# Altium footprint library MY_LIB_Connectors_CONNFLY.PcbLib: 239 footprints (part 13 of 15)
Each footprint in its own frame and in the unit in brackets; x right, y up, seen from the top. Pads: shape width x height; smd on the part's side, far side on the other; paste and mask are expansions set on the pad; w line width, h text height; cw(c..) or ccw(c..) is an arc to the next point about the centre after c.
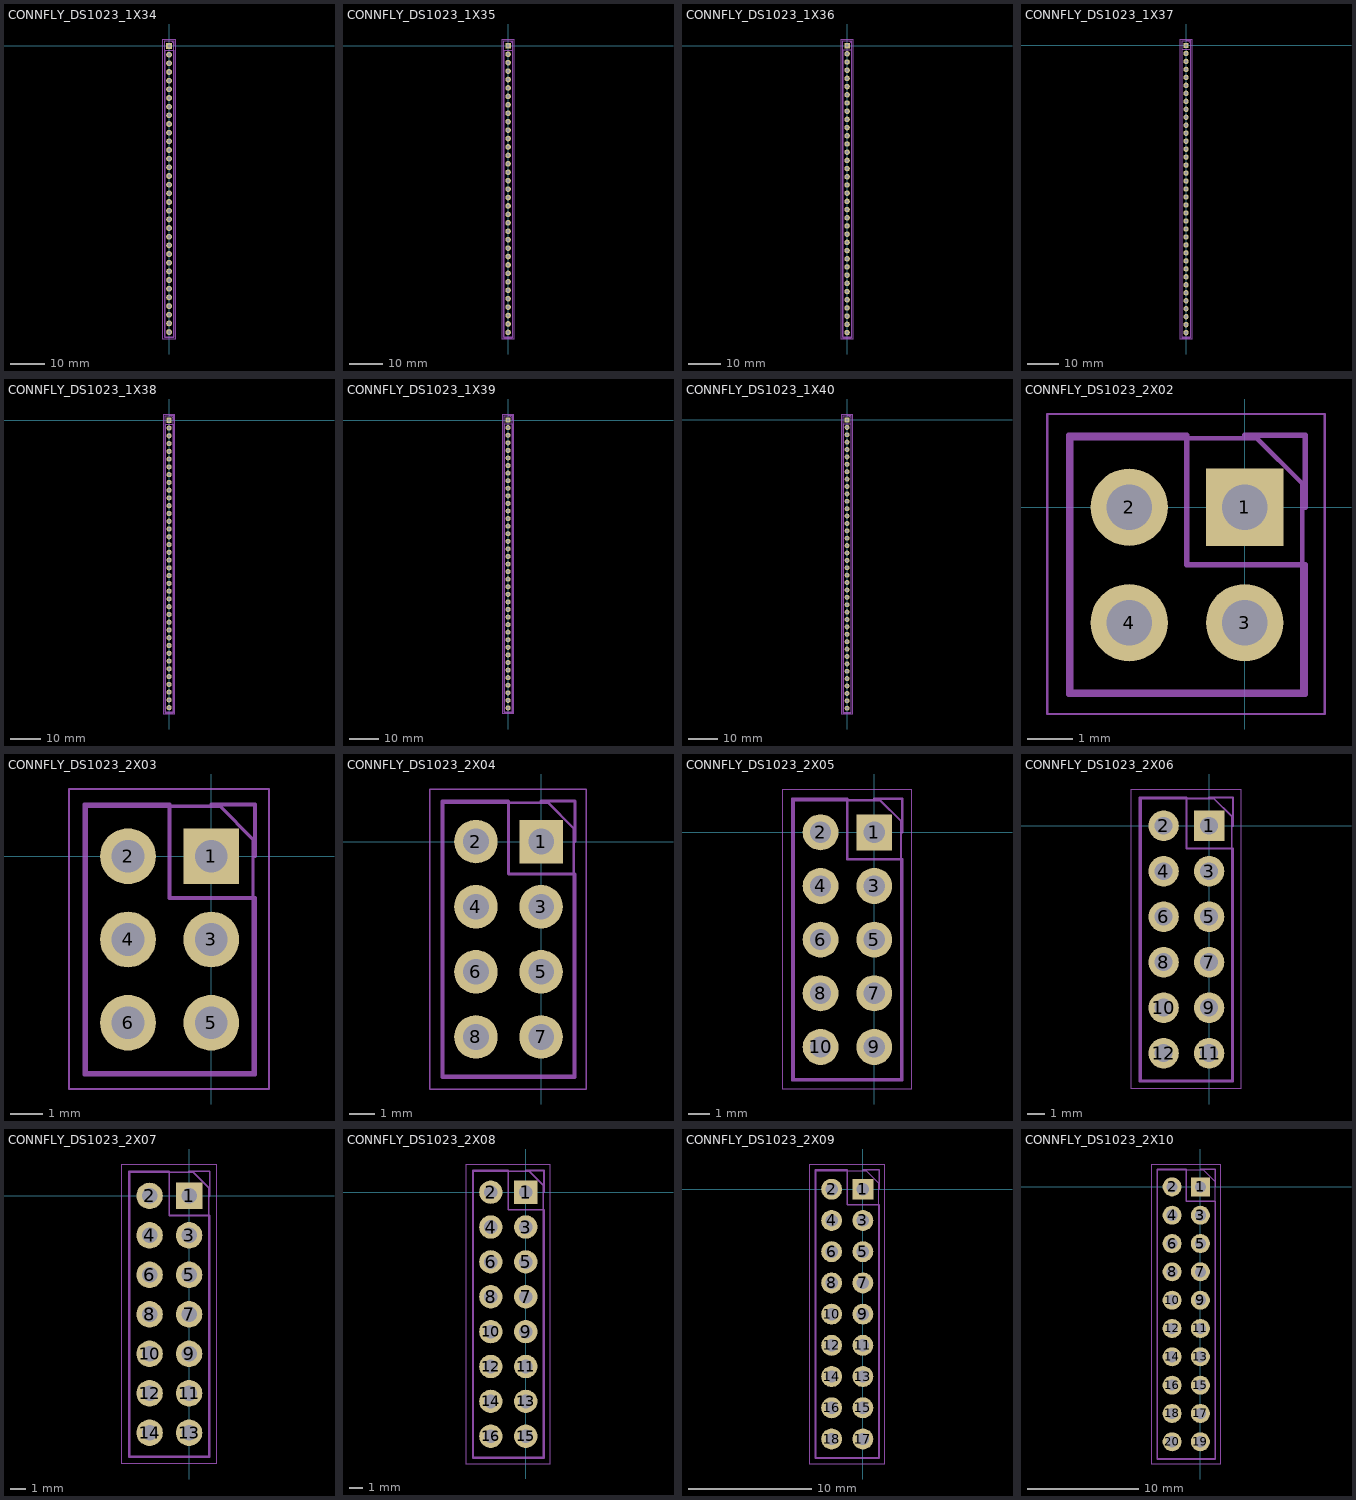
[diagram p12: the footprints below, top view; thin cyan lines are the x and y axes]

## CONNFLY_DS1023_1X34 [mm] "Connfly DS1023 1x34 standard KiCad; PTH1.0 pad1.7 pitch2.54; CC-BY-SA-4.0; STEP generic"
height 8.5
pads (34):
  rect 1.7x1.7 hole 1 paste-2539.97 mask+0.05: 1(0,0)
  round 1.7 hole 1 paste-2539.97 mask+0.05: 2(0,-2.54) 3(0,-5.08) 4(0,-7.62) 5(0,-10.16) 6(0,-12.7) 7(0,-15.24) 8(0,-17.78) 9(0,-20.32) 10(0,-22.86) 11(0,-25.4) 12(0,-27.94) 13(0,-30.48) 14(0,-33.02) 15(0,-35.56) 16(0,-38.1) 17(0,-40.64) 18(0,-43.18) 19(0,-45.72) 20(0,-48.26) 21(0,-50.8) 22(0,-53.34) 23(0,-55.88) 24(0,-58.42) 25(0,-60.96) 26(0,-63.5) 27(0,-66.04) 28(0,-68.58) 29(0,-71.12) 30(0,-73.66) 31(0,-76.2) 32(0,-78.74) 33(0,-81.28) 34(0,-83.82)
Mechanical 15:
  lines w0.05: -1.8,-85.85 -1.8,2.05 1.75,2.05 1.75,-85.85 -1.8,-85.85
  lines w0.1: -1.27,-85.34 -1.27,1.52 0.635,1.52 1.27,0.885 1.27,-85.34 -1.27,-85.34
  lines w0.12: 0,1.58 1.33,1.58 1.33,0 ; -1.33,-85.4 -1.33,-1.27 1.33,-1.27 1.33,-85.4 -1.33,-85.4
3D body "PinSocket_1x34_P2.54mm_Vertical.step": height 8.5, standoff -3.1, extent -1.27,-85.34 1.27,1.52

## CONNFLY_DS1023_1X35 [mm] "Connfly DS1023 1x35 standard KiCad; PTH1.0 pad1.7 pitch2.54; CC-BY-SA-4.0; STEP generic"
height 8.5
pads (35):
  rect 1.7x1.7 hole 1 paste-2539.97 mask+0.05: 1(0,0)
  round 1.7 hole 1 paste-2539.97 mask+0.05: 2(0,-2.54) 3(0,-5.08) 4(0,-7.62) 5(0,-10.16) 6(0,-12.7) 7(0,-15.24) 8(0,-17.78) 9(0,-20.32) 10(0,-22.86) 11(0,-25.4) 12(0,-27.94) 13(0,-30.48) 14(0,-33.02) 15(0,-35.56) 16(0,-38.1) 17(0,-40.64) 18(0,-43.18) 19(0,-45.72) 20(0,-48.26) 21(0,-50.8) 22(0,-53.34) 23(0,-55.88) 24(0,-58.42) 25(0,-60.96) 26(0,-63.5) 27(0,-66.04) 28(0,-68.58) 29(0,-71.12) 30(0,-73.66) 31(0,-76.2) 32(0,-78.74) 33(0,-81.28) 34(0,-83.82) 35(0,-86.36)
Mechanical 15:
  lines w0.05: -1.8,-88.35 -1.8,2.05 1.75,2.05 1.75,-88.35 -1.8,-88.35
  lines w0.1: -1.27,-87.88 -1.27,1.52 0.635,1.52 1.27,0.885 1.27,-87.88 -1.27,-87.88
  lines w0.12: 0,1.58 1.33,1.58 1.33,0 ; -1.33,-87.94 -1.33,-1.27 1.33,-1.27 1.33,-87.94 -1.33,-87.94
3D body "PinSocket_1x35_P2.54mm_Vertical.step": height 8.5, standoff -3.1, extent -1.27,-87.88 1.27,1.52

## CONNFLY_DS1023_1X36 [mm] "Connfly DS1023 1x36 standard KiCad; PTH1.0 pad1.7 pitch2.54; CC-BY-SA-4.0; STEP generic"
height 8.5
pads (36):
  rect 1.7x1.7 hole 1 paste-2539.97 mask+0.05: 1(0,0)
  round 1.7 hole 1 paste-2539.97 mask+0.05: 2(0,-2.54) 3(0,-5.08) 4(0,-7.62) 5(0,-10.16) 6(0,-12.7) 7(0,-15.24) 8(0,-17.78) 9(0,-20.32) 10(0,-22.86) 11(0,-25.4) 12(0,-27.94) 13(0,-30.48) 14(0,-33.02) 15(0,-35.56) 16(0,-38.1) 17(0,-40.64) 18(0,-43.18) 19(0,-45.72) 20(0,-48.26) 21(0,-50.8) 22(0,-53.34) 23(0,-55.88) 24(0,-58.42) 25(0,-60.96) 26(0,-63.5) 27(0,-66.04) 28(0,-68.58) 29(0,-71.12) 30(0,-73.66) 31(0,-76.2) 32(0,-78.74) 33(0,-81.28) 34(0,-83.82) 35(0,-86.36) 36(0,-88.9)
Mechanical 15:
  lines w0.05: -1.8,-90.9 -1.8,2.05 1.75,2.05 1.75,-90.9 -1.8,-90.9
  lines w0.1: -1.27,-90.42 -1.27,1.52 0.635,1.52 1.27,0.885 1.27,-90.42 -1.27,-90.42
  lines w0.12: 0,1.58 1.33,1.58 1.33,0 ; -1.33,-90.48 -1.33,-1.27 1.33,-1.27 1.33,-90.48 -1.33,-90.48
3D body "PinSocket_1x36_P2.54mm_Vertical.step": height 8.5, standoff -3.1, extent -1.27,-90.42 1.27,1.52

## CONNFLY_DS1023_1X37 [mm] "Connfly DS1023 1x37 standard KiCad; PTH1.0 pad1.7 pitch2.54; CC-BY-SA-4.0; STEP generic"
height 8.5
pads (37):
  rect 1.7x1.7 hole 1 paste-2539.97 mask+0.05: 1(0,0)
  round 1.7 hole 1 paste-2539.97 mask+0.05: 2(0,-2.54) 3(0,-5.08) 4(0,-7.62) 5(0,-10.16) 6(0,-12.7) 7(0,-15.24) 8(0,-17.78) 9(0,-20.32) 10(0,-22.86) 11(0,-25.4) 12(0,-27.94) 13(0,-30.48) 14(0,-33.02) 15(0,-35.56) 16(0,-38.1) 17(0,-40.64) 18(0,-43.18) 19(0,-45.72) 20(0,-48.26) 21(0,-50.8) 22(0,-53.34) 23(0,-55.88) 24(0,-58.42) 25(0,-60.96) 26(0,-63.5) 27(0,-66.04) 28(0,-68.58) 29(0,-71.12) 30(0,-73.66) 31(0,-76.2) 32(0,-78.74) 33(0,-81.28) 34(0,-83.82) 35(0,-86.36) 36(0,-88.9) 37(0,-91.44)
Mechanical 15:
  lines w0.05: -1.8,-93.45 -1.8,2.05 1.75,2.05 1.75,-93.45 -1.8,-93.45
  lines w0.1: -1.27,-92.96 -1.27,1.52 0.635,1.52 1.27,0.885 1.27,-92.96 -1.27,-92.96
  lines w0.12: 0,1.58 1.33,1.58 1.33,0 ; -1.33,-93.02 -1.33,-1.27 1.33,-1.27 1.33,-93.02 -1.33,-93.02
3D body "PinSocket_1x37_P2.54mm_Vertical.step": height 8.5, standoff -3.1, extent -1.27,-92.96 1.27,1.52

## CONNFLY_DS1023_1X38 [mm] "Connfly DS1023 1x38 standard KiCad; PTH1.0 pad1.7 pitch2.54; CC-BY-SA-4.0; STEP generic"
height 8.5
pads (38):
  rect 1.7x1.7 hole 1 paste-2539.97 mask+0.05: 1(0,0)
  round 1.7 hole 1 paste-2539.97 mask+0.05: 2(0,-2.54) 3(0,-5.08) 4(0,-7.62) 5(0,-10.16) 6(0,-12.7) 7(0,-15.24) 8(0,-17.78) 9(0,-20.32) 10(0,-22.86) 11(0,-25.4) 12(0,-27.94) 13(0,-30.48) 14(0,-33.02) 15(0,-35.56) 16(0,-38.1) 17(0,-40.64) 18(0,-43.18) 19(0,-45.72) 20(0,-48.26) 21(0,-50.8) 22(0,-53.34) 23(0,-55.88) 24(0,-58.42) 25(0,-60.96) 26(0,-63.5) 27(0,-66.04) 28(0,-68.58) 29(0,-71.12) 30(0,-73.66) 31(0,-76.2) 32(0,-78.74) 33(0,-81.28) 34(0,-83.82) 35(0,-86.36) 36(0,-88.9) 37(0,-91.44) 38(0,-93.98)
Mechanical 15:
  lines w0.05: -1.8,-96.05 -1.8,2.05 1.75,2.05 1.75,-96.05 -1.8,-96.05
  lines w0.1: -1.27,-95.5 -1.27,1.52 0.635,1.52 1.27,0.885 1.27,-95.5 -1.27,-95.5
  lines w0.12: 0,1.58 1.33,1.58 1.33,0 ; -1.33,-95.56 -1.33,-1.27 1.33,-1.27 1.33,-95.56 -1.33,-95.56
3D body "PinSocket_1x38_P2.54mm_Vertical.step": height 8.5, standoff -3.1, extent -1.27,-95.5 1.27,1.52

## CONNFLY_DS1023_1X39 [mm] "Connfly DS1023 1x39 standard KiCad; PTH1.0 pad1.7 pitch2.54; CC-BY-SA-4.0; STEP generic"
height 8.5
pads (39):
  rect 1.7x1.7 hole 1 paste-2539.97 mask+0.05: 1(0,0)
  round 1.7 hole 1 paste-2539.97 mask+0.05: 2(0,-2.54) 3(0,-5.08) 4(0,-7.62) 5(0,-10.16) 6(0,-12.7) 7(0,-15.24) 8(0,-17.78) 9(0,-20.32) 10(0,-22.86) 11(0,-25.4) 12(0,-27.94) 13(0,-30.48) 14(0,-33.02) 15(0,-35.56) 16(0,-38.1) 17(0,-40.64) 18(0,-43.18) 19(0,-45.72) 20(0,-48.26) 21(0,-50.8) 22(0,-53.34) 23(0,-55.88) 24(0,-58.42) 25(0,-60.96) 26(0,-63.5) 27(0,-66.04) 28(0,-68.58) 29(0,-71.12) 30(0,-73.66) 31(0,-76.2) 32(0,-78.74) 33(0,-81.28) 34(0,-83.82) 35(0,-86.36) 36(0,-88.9) 37(0,-91.44) 38(0,-93.98) 39(0,-96.52)
Mechanical 15:
  lines w0.05: -1.8,-98.55 -1.8,2.05 1.75,2.05 1.75,-98.55 -1.8,-98.55
  lines w0.1: -1.27,-98.04 -1.27,1.52 0.635,1.52 1.27,0.885 1.27,-98.04 -1.27,-98.04
  lines w0.12: 0,1.58 1.33,1.58 1.33,0 ; -1.33,-98.1 -1.33,-1.27 1.33,-1.27 1.33,-98.1 -1.33,-98.1
3D body "PinSocket_1x39_P2.54mm_Vertical.step": height 8.5, standoff -3.1, extent -1.27,-98.04 1.27,1.52

## CONNFLY_DS1023_1X40 [mm] "Connfly DS1023 1x40 standard KiCad; PTH1.0 pad1.7 pitch2.54; CC-BY-SA-4.0; STEP generic"
height 8.5
pads (40):
  rect 1.7x1.7 hole 1 paste-2539.97 mask+0.05: 1(0,0)
  round 1.7 hole 1 paste-2539.97 mask+0.05: 2(0,-2.54) 3(0,-5.08) 4(0,-7.62) 5(0,-10.16) 6(0,-12.7) 7(0,-15.24) 8(0,-17.78) 9(0,-20.32) 10(0,-22.86) 11(0,-25.4) 12(0,-27.94) 13(0,-30.48) 14(0,-33.02) 15(0,-35.56) 16(0,-38.1) 17(0,-40.64) 18(0,-43.18) 19(0,-45.72) 20(0,-48.26) 21(0,-50.8) 22(0,-53.34) 23(0,-55.88) 24(0,-58.42) 25(0,-60.96) 26(0,-63.5) 27(0,-66.04) 28(0,-68.58) 29(0,-71.12) 30(0,-73.66) 31(0,-76.2) 32(0,-78.74) 33(0,-81.28) 34(0,-83.82) 35(0,-86.36) 36(0,-88.9) 37(0,-91.44) 38(0,-93.98) 39(0,-96.52) 40(0,-99.06)
Mechanical 15:
  lines w0.05: -1.8,-101.05 -1.8,2.05 1.75,2.05 1.75,-101.05 -1.8,-101.05
  lines w0.1: -1.27,-100.58 -1.27,1.52 0.635,1.52 1.27,0.885 1.27,-100.58 -1.27,-100.58
  lines w0.12: 0,1.58 1.33,1.58 1.33,0 ; -1.33,-100.64 -1.33,-1.27 1.33,-1.27 1.33,-100.64 -1.33,-100.64
3D body "PinSocket_1x40_P2.54mm_Vertical.step": height 8.5, standoff -3.1, extent -1.27,-100.58 1.27,1.52

## CONNFLY_DS1023_2X02 [mm] "Connfly DS1023 2x2 standard KiCad; PTH1.0 pad1.7 pitch2.54; CC-BY-SA-4.0; STEP generic"
height 8.5
pads (4):
  rect 1.7x1.7 hole 1 paste-2539.97 mask+0.05: 1(0,0)
  round 1.7 hole 1 paste-2539.97 mask+0.05: 2(-2.54,0) 3(0,-2.54) 4(-2.54,-2.54)
Mechanical 15:
  lines w0.05: -4.34,-4.55 -4.34,2.05 1.76,2.05 1.76,-4.55 -4.34,-4.55
  lines w0.1: -3.81,-4.06 -3.81,1.52 0.27,1.52 1.27,0.52 1.27,-4.06 -3.81,-4.06
  lines w0.12: 0,1.58 1.33,1.58 1.33,0 ; -3.87,-4.12 -3.87,1.58 -1.27,1.58 -1.27,-1.27 1.33,-1.27 1.33,-4.12 -3.87,-4.12
3D body "PinSocket_2x02_P2.54mm_Vertical.step": height 8.5, standoff -3.1, extent -3.81,-4.06 1.27,1.52

## CONNFLY_DS1023_2X03 [mm] "Connfly DS1023 2x3 standard KiCad; PTH1.0 pad1.7 pitch2.54; CC-BY-SA-4.0; STEP generic"
height 8.5
pads (6):
  rect 1.7x1.7 hole 1 paste-2539.97 mask+0.05: 1(0,0)
  round 1.7 hole 1 paste-2539.97 mask+0.05: 2(-2.54,0) 3(0,-2.54) 4(-2.54,-2.54) 5(0,-5.08) 6(-2.54,-5.08)
Mechanical 15:
  lines w0.05: -4.34,-7.1 -4.34,2.05 1.76,2.05 1.76,-7.1 -4.34,-7.1
  lines w0.1: -3.81,-6.6 -3.81,1.52 0.27,1.52 1.27,0.52 1.27,-6.6 -3.81,-6.6
  lines w0.12: 0,1.58 1.33,1.58 1.33,0 ; -3.87,-6.66 -3.87,1.58 -1.27,1.58 -1.27,-1.27 1.33,-1.27 1.33,-6.66 -3.87,-6.66
3D body "PinSocket_2x03_P2.54mm_Vertical.step": height 8.5, standoff -3.1, extent -3.81,-6.6 1.27,1.52

## CONNFLY_DS1023_2X04 [mm] "Connfly DS1023 2x4 standard KiCad; PTH1.0 pad1.7 pitch2.54; CC-BY-SA-4.0; STEP generic"
height 8.5
pads (8):
  rect 1.7x1.7 hole 1 paste-2539.97 mask+0.05: 1(0,0)
  round 1.7 hole 1 paste-2539.97 mask+0.05: 2(-2.54,0) 3(0,-2.54) 4(-2.54,-2.54) 5(0,-5.08) 6(-2.54,-5.08) 7(0,-7.62) 8(-2.54,-7.62)
Mechanical 15:
  lines w0.05: -4.34,-9.65 -4.34,2.05 1.76,2.05 1.76,-9.65 -4.34,-9.65
  lines w0.1: -3.81,-9.14 -3.81,1.52 0.27,1.52 1.27,0.52 1.27,-9.14 -3.81,-9.14
  lines w0.12: 0,1.58 1.33,1.58 1.33,0 ; -3.87,-9.2 -3.87,1.58 -1.27,1.58 -1.27,-1.27 1.33,-1.27 1.33,-9.2 -3.87,-9.2
3D body "PinSocket_2x04_P2.54mm_Vertical.step": height 8.5, standoff -3.1, extent -3.81,-9.14 1.27,1.52

## CONNFLY_DS1023_2X05 [mm] "Connfly DS1023 2x5 standard KiCad; PTH1.0 pad1.7 pitch2.54; CC-BY-SA-4.0; STEP generic"
height 8.5
pads (10):
  rect 1.7x1.7 hole 1 paste-2539.97 mask+0.05: 1(0,0)
  round 1.7 hole 1 paste-2539.97 mask+0.05: 2(-2.54,0) 3(0,-2.54) 4(-2.54,-2.54) 5(0,-5.08) 6(-2.54,-5.08) 7(0,-7.62) 8(-2.54,-7.62) 9(0,-10.16) 10(-2.54,-10.16)
Mechanical 15:
  lines w0.05: -4.34,-12.15 -4.34,2.05 1.76,2.05 1.76,-12.15 -4.34,-12.15
  lines w0.1: -3.81,-11.68 -3.81,1.52 0.27,1.52 1.27,0.52 1.27,-11.68 -3.81,-11.68
  lines w0.12: 0,1.58 1.33,1.58 1.33,0 ; -3.87,-11.74 -3.87,1.58 -1.27,1.58 -1.27,-1.27 1.33,-1.27 1.33,-11.74 -3.87,-11.74
3D body "PinSocket_2x05_P2.54mm_Vertical.step": height 8.5, standoff -3.1, extent -3.81,-11.68 1.27,1.52

## CONNFLY_DS1023_2X06 [mm] "Connfly DS1023 2x6 standard KiCad; PTH1.0 pad1.7 pitch2.54; CC-BY-SA-4.0; STEP generic"
height 8.5
pads (12):
  rect 1.7x1.7 hole 1 paste-2539.97 mask+0.05: 1(0,0)
  round 1.7 hole 1 paste-2539.97 mask+0.05: 2(-2.54,0) 3(0,-2.54) 4(-2.54,-2.54) 5(0,-5.08) 6(-2.54,-5.08) 7(0,-7.62) 8(-2.54,-7.62) 9(0,-10.16) 10(-2.54,-10.16) 11(0,-12.7) 12(-2.54,-12.7)
Mechanical 15:
  lines w0.05: -4.34,-14.7 -4.34,2.05 1.76,2.05 1.76,-14.7 -4.34,-14.7
  lines w0.1: -3.81,-14.22 -3.81,1.52 0.27,1.52 1.27,0.52 1.27,-14.22 -3.81,-14.22
  lines w0.12: 0,1.58 1.33,1.58 1.33,0 ; -3.87,-14.28 -3.87,1.58 -1.27,1.58 -1.27,-1.27 1.33,-1.27 1.33,-14.28 -3.87,-14.28
3D body "PinSocket_2x06_P2.54mm_Vertical.step": height 8.5, standoff -3.1, extent -3.81,-14.22 1.27,1.52

## CONNFLY_DS1023_2X07 [mm] "Connfly DS1023 2x7 standard KiCad; PTH1.0 pad1.7 pitch2.54; CC-BY-SA-4.0; STEP generic"
height 8.5
pads (14):
  rect 1.7x1.7 hole 1 paste-2539.97 mask+0.05: 1(0,0)
  round 1.7 hole 1 paste-2539.97 mask+0.05: 2(-2.54,0) 3(0,-2.54) 4(-2.54,-2.54) 5(0,-5.08) 6(-2.54,-5.08) 7(0,-7.62) 8(-2.54,-7.62) 9(0,-10.16) 10(-2.54,-10.16) 11(0,-12.7) 12(-2.54,-12.7) 13(0,-15.24) 14(-2.54,-15.24)
Mechanical 15:
  lines w0.05: -4.34,-17.25 -4.34,2.05 1.76,2.05 1.76,-17.25 -4.34,-17.25
  lines w0.1: -3.81,-16.76 -3.81,1.52 0.27,1.52 1.27,0.52 1.27,-16.76 -3.81,-16.76
  lines w0.12: 0,1.58 1.33,1.58 1.33,0 ; -3.87,-16.82 -3.87,1.58 -1.27,1.58 -1.27,-1.27 1.33,-1.27 1.33,-16.82 -3.87,-16.82
3D body "PinSocket_2x07_P2.54mm_Vertical.step": height 8.5, standoff -3.1, extent -3.81,-16.76 1.27,1.52

## CONNFLY_DS1023_2X08 [mm] "Connfly DS1023 2x8 standard KiCad; PTH1.0 pad1.7 pitch2.54; CC-BY-SA-4.0; STEP generic"
height 8.5
pads (16):
  rect 1.7x1.7 hole 1 paste-2539.97 mask+0.05: 1(0,0)
  round 1.7 hole 1 paste-2539.97 mask+0.05: 2(-2.54,0) 3(0,-2.54) 4(-2.54,-2.54) 5(0,-5.08) 6(-2.54,-5.08) 7(0,-7.62) 8(-2.54,-7.62) 9(0,-10.16) 10(-2.54,-10.16) 11(0,-12.7) 12(-2.54,-12.7) 13(0,-15.24) 14(-2.54,-15.24) 15(0,-17.78) 16(-2.54,-17.78)
Mechanical 15:
  lines w0.05: -4.34,-19.8 -4.34,2.05 1.76,2.05 1.76,-19.8 -4.34,-19.8
  lines w0.1: -3.81,-19.3 -3.81,1.52 0.27,1.52 1.27,0.52 1.27,-19.3 -3.81,-19.3
  lines w0.12: 0,1.58 1.33,1.58 1.33,0 ; -3.87,-19.36 -3.87,1.58 -1.27,1.58 -1.27,-1.27 1.33,-1.27 1.33,-19.36 -3.87,-19.36
3D body "PinSocket_2x08_P2.54mm_Vertical.step": height 8.5, standoff -3.1, extent -3.81,-19.3 1.27,1.52

## CONNFLY_DS1023_2X09 [mm] "Connfly DS1023 2x9 standard KiCad; PTH1.0 pad1.7 pitch2.54; CC-BY-SA-4.0; STEP generic"
height 8.5
pads (18):
  rect 1.7x1.7 hole 1 paste-2539.97 mask+0.05: 1(0,0)
  round 1.7 hole 1 paste-2539.97 mask+0.05: 2(-2.54,0) 3(0,-2.54) 4(-2.54,-2.54) 5(0,-5.08) 6(-2.54,-5.08) 7(0,-7.62) 8(-2.54,-7.62) 9(0,-10.16) 10(-2.54,-10.16) 11(0,-12.7) 12(-2.54,-12.7) 13(0,-15.24) 14(-2.54,-15.24) 15(0,-17.78) 16(-2.54,-17.78) 17(0,-20.32) 18(-2.54,-20.32)
Mechanical 15:
  lines w0.05: -4.34,-22.35 -4.34,2.05 1.76,2.05 1.76,-22.35 -4.34,-22.35
  lines w0.1: -3.81,-21.84 -3.81,1.52 0.27,1.52 1.27,0.52 1.27,-21.84 -3.81,-21.84
  lines w0.12: 0,1.58 1.33,1.58 1.33,0 ; -3.87,-21.9 -3.87,1.58 -1.27,1.58 -1.27,-1.27 1.33,-1.27 1.33,-21.9 -3.87,-21.9
3D body "PinSocket_2x09_P2.54mm_Vertical.step": height 8.5, standoff -3.1, extent -3.81,-21.84 1.27,1.52

## CONNFLY_DS1023_2X10 [mm] "Connfly DS1023 2x10 standard KiCad; PTH1.0 pad1.7 pitch2.54; CC-BY-SA-4.0; STEP generic"
height 8.5
pads (20):
  rect 1.7x1.7 hole 1 paste-2539.97 mask+0.05: 1(0,0)
  round 1.7 hole 1 paste-2539.97 mask+0.05: 2(-2.54,0) 3(0,-2.54) 4(-2.54,-2.54) 5(0,-5.08) 6(-2.54,-5.08) 7(0,-7.62) 8(-2.54,-7.62) 9(0,-10.16) 10(-2.54,-10.16) 11(0,-12.7) 12(-2.54,-12.7) 13(0,-15.24) 14(-2.54,-15.24) 15(0,-17.78) 16(-2.54,-17.78) 17(0,-20.32) 18(-2.54,-20.32) 19(0,-22.86) 20(-2.54,-22.86)
Mechanical 15:
  lines w0.05: -4.34,-24.85 -4.34,2.05 1.76,2.05 1.76,-24.85 -4.34,-24.85
  lines w0.1: -3.81,-24.38 -3.81,1.52 0.27,1.52 1.27,0.52 1.27,-24.38 -3.81,-24.38
  lines w0.12: 0,1.58 1.33,1.58 1.33,0 ; -3.87,-24.44 -3.87,1.58 -1.27,1.58 -1.27,-1.27 1.33,-1.27 1.33,-24.44 -3.87,-24.44
3D body "PinSocket_2x10_P2.54mm_Vertical.step": height 8.5, standoff -3.1, extent -3.81,-24.38 1.27,1.52